# Altium footprint library 1.10-电容.PcbLib: 193 footprints (part 5 of 13)
Each footprint in its own frame and in the unit in brackets; x right, y up, seen from the top. Pads: shape width x height; smd on the part's side, far side on the other; paste and mask are expansions set on the pad; w line width, h text height; cw(c..) or ccw(c..) is an arc to the next point about the centre after c.
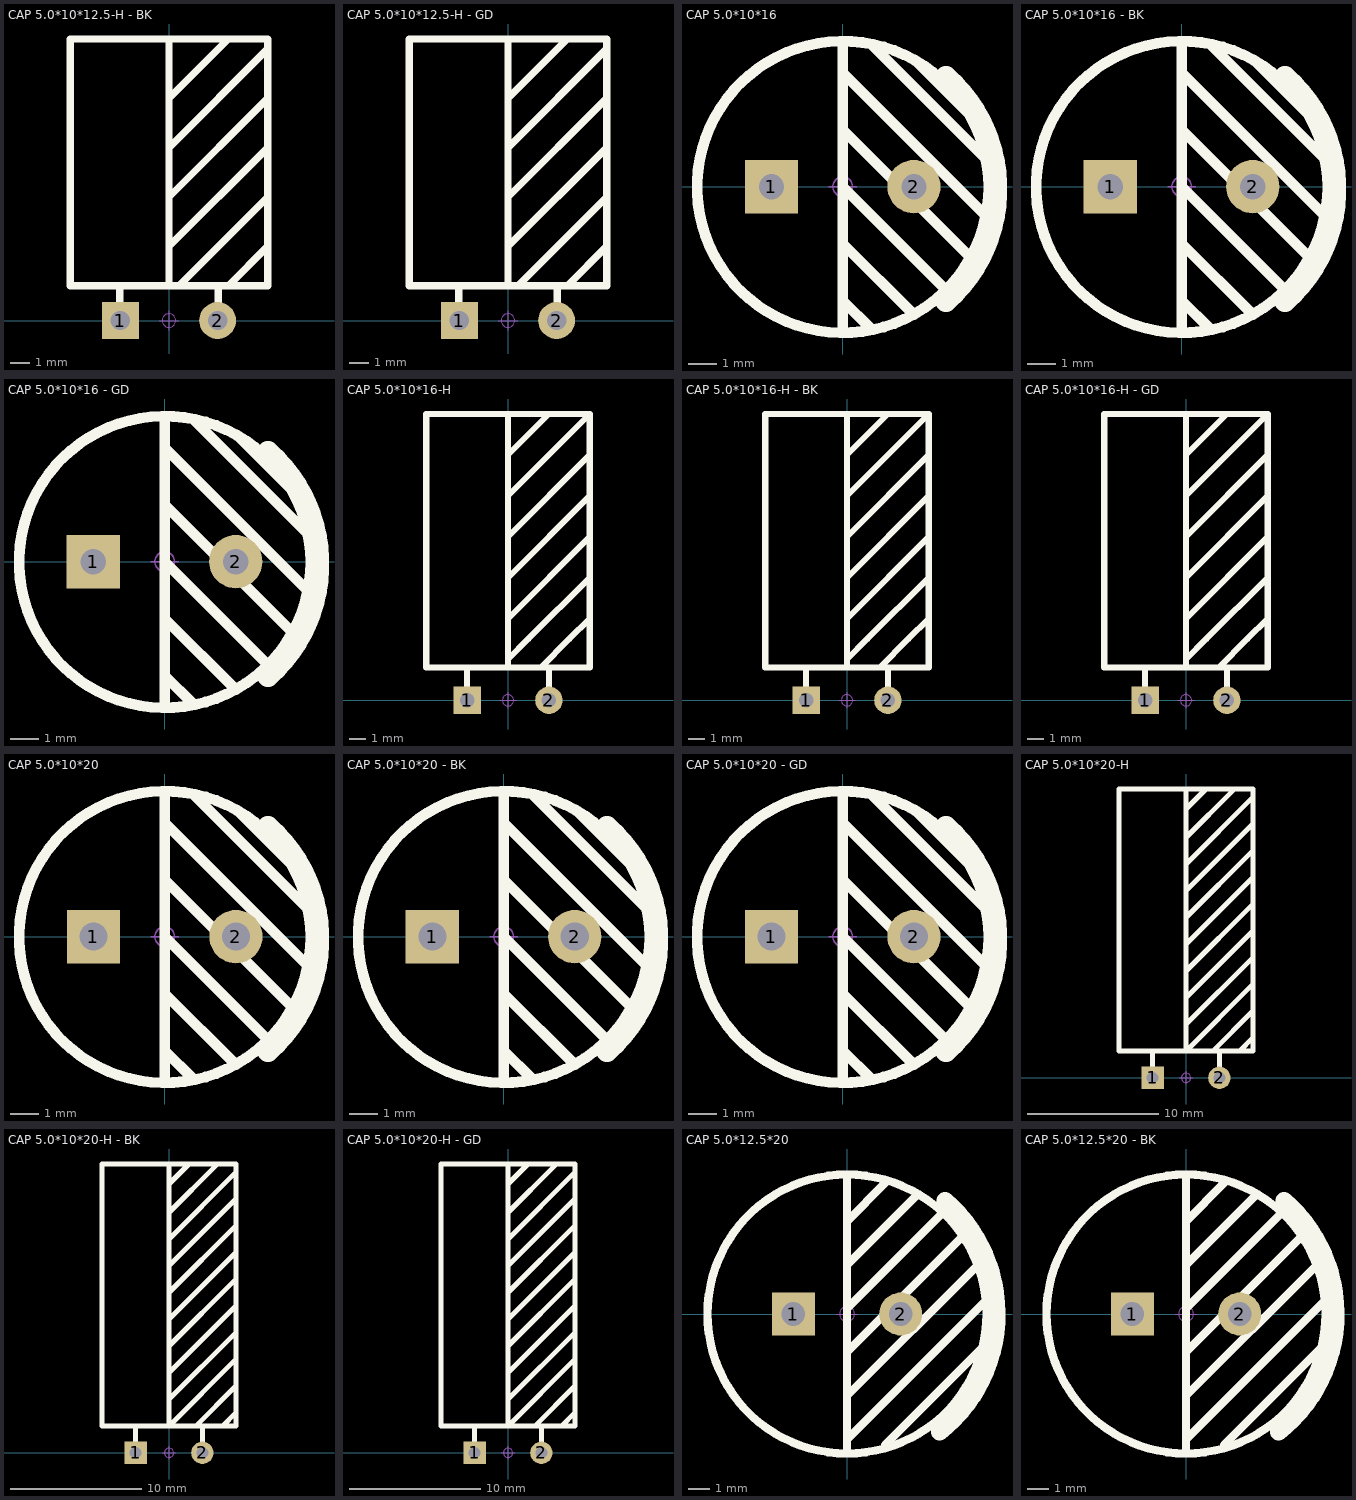
[diagram p4: the footprints below, top view; thin cyan lines are the x and y axes]

## CAP 5.0*10*12.5-H - BK [mm] "脚距5mm直径10mm高度12.5mm             淘宝ID:黄晶宝石"
pads (2):
  rect 1.9x1.9 hole 1: 1(-2.5,0)
  round 1.9 hole 1: 2(2.5,0)
Top Overlay:
  lines w0.381: -2.54,0.762 -2.54,1.778 ; 0,1.778 0,14.41 ; 0,3.81 5.08,8.89 ; 0,6.35 5.08,11.43 ; 0,8.89 5.08,13.97 ; 0,11.43 3.048,14.478 ; 0.508,1.778 5.08,6.35 ; 2.54,0.762 2.54,1.778 ; 3.048,1.778 5.08,3.81 ; -5.08,1.778 -5.08,14.478 5.08,14.478 5.08,1.778 -5.08,1.778
Mechanical 15:
  circle w0.05: c0,0 r0.35
  lines w0.05: -0.5,0 0.5,0 ; 0,-0.5 0,0.5
3D body "CAP 5X10X12.5-H.STEP": height 10.03, standoff -3.48, extent -5,-0.3 5.01,14.41

## CAP 5.0*10*12.5-H - GD [mm] "脚距5mm直径10mm高度12.5mm"
pads (2):
  rect 1.9x1.9 hole 1: 1(-2.5,0)
  round 1.9 hole 1: 2(2.5,0)
Top Overlay:
  lines w0.381: -2.54,0.762 -2.54,1.778 ; 0,1.778 0,14.41 ; 0,3.81 5.08,8.89 ; 0,6.35 5.08,11.43 ; 0,8.89 5.08,13.97 ; 0,11.43 3.048,14.478 ; 0.508,1.778 5.08,6.35 ; 2.54,0.762 2.54,1.778 ; 3.048,1.778 5.08,3.81 ; -5.08,1.778 5.08,1.778 5.08,14.478 -5.08,14.478 -5.08,1.778
Mechanical 15:
  circle w0.05: c0,0 r0.35
  lines w0.05: -0.5,0 0.5,0 ; 0,-0.5 0,0.5
3D body "CAP 5X10X12.5-H.STEP": height 10.03, standoff -3.48, extent -5,-0.3 5.01,14.41

## CAP 5.0*10*16 [mm] "脚距5mm直径10mm高度16mm"
pads (2):
  rect 1.9x1.9 hole 0.9: 1(-2.54,0)
  round 1.9 hole 0.9: 2(2.54,0)
Top Overlay:
  circle w0.381: c0.006,-0.013 r5.2
  lines w0.381: 0,0 3.556,-3.556 ; 0.006,-5.197 0.006,5.072 ; 0.006,-5.082 0.006,-5.075 ; 0.006,-4.064 0.006,-4.07 1.016,-5.08 ; 0.006,-3.054 0.006,-3.05 0.006,-3.043 ; 0.006,-2.032 0.006,-2.038 ; 0.006,1.01 0.006,1.016 ; 0.006,2.032 0.006,2.026 4.572,-2.54 ; 0.006,4.064 0.006,4.058 5.08,-1.016 ; 0.006,5.074 0.006,5.187 ; 1.016,5.08 5.08,1.016 ; 2.54,-4.572 0.006,-2.038 ; 2.667,4.445 4.572,2.54 ; 0.006,-2.038 0.006,-2.038
  lines w0.737: 3.683,-4.105 ccw(c0.153,-0.084) 3.683,3.937
Mechanical 15:
  circle w0.05: c0,0 r0.35
  lines w0.05: -0.5,0 0.5,0 ; 0,-0.5 0,0.5
3D body "CAP 5X10X16.STEP": height 16.04, standoff -3.37, extent -5,-5 5.01,5

## CAP 5.0*10*16 - BK [mm] "脚距5mm直径10mm高度16mm"
pads (2):
  rect 1.9x1.9 hole 0.9: 1(-2.54,0)
  round 1.9 hole 0.9: 2(2.54,0)
Top Overlay:
  circle w0.381: c0.012,-0.013 r5.2
  lines w0.381: 0.006,0 3.562,-3.556 ; 0.012,-5.197 0.012,5.072 ; 0.012,-5.082 0.012,-5.075 ; 0.012,-4.064 0.012,-4.07 1.022,-5.08 ; 0.012,-3.054 0.012,-3.05 0.012,-3.043 ; 0.012,-2.032 0.012,-2.038 ; 0.012,1.01 0.012,1.016 ; 0.012,2.032 0.012,2.026 4.578,-2.54 ; 0.012,4.064 0.012,4.058 5.086,-1.016 ; 0.012,5.074 0.012,5.187 ; 1.022,5.08 5.086,1.016 ; 2.546,-4.572 0.012,-2.038 ; 2.673,4.445 4.578,2.54 ; 0.012,-2.038 0.012,-2.038
  lines w0.737: 3.689,-4.105 ccw(c0.159,-0.084) 3.689,3.937
Mechanical 15:
  circle w0.05: c0.006,0 r0.35
  lines w0.05: -0.494,0 0.506,0 ; 0.006,-0.5 0.006,0.5
3D body "CAP 5X10X16.STEP": height 16.04, standoff -3.37, extent -5,-5 5.01,5

## CAP 5.0*10*16 - GD [mm] "脚距5mm直径10mm高度16mm"
pads (2):
  rect 1.9x1.9 hole 0.9: 1(-2.54,0)
  round 1.9 hole 0.9: 2(2.54,0)
Top Overlay:
  circle w0.381: c0.012,-0.013 r5.2
  lines w0.381: 0.006,0 3.562,-3.556 ; 0.012,-5.197 0.012,5.072 ; 0.012,-5.082 0.012,-5.075 ; 0.012,-4.064 0.012,-4.07 1.022,-5.08 ; 0.012,-3.054 0.012,-3.05 0.012,-3.043 ; 0.012,-2.032 0.012,-2.038 ; 0.012,1.01 0.012,1.016 ; 0.012,2.032 0.012,2.026 4.578,-2.54 ; 0.012,4.064 0.012,4.058 5.086,-1.016 ; 0.012,5.074 0.012,5.187 ; 1.022,5.08 5.086,1.016 ; 2.546,-4.572 0.012,-2.038 ; 2.673,4.445 4.578,2.54 ; 0.012,-2.038 0.012,-2.038
  lines w0.737: 3.689,-4.105 ccw(c0.159,-0.084) 3.689,3.937
Mechanical 15:
  circle w0.05: c0.006,0 r0.35
  lines w0.05: -0.494,0 0.506,0 ; 0.006,-0.5 0.006,0.5
3D body "CAP 5X10X16.STEP": height 16.04, standoff -3.37, extent -5,-5 5.01,5

## CAP 5.0*10*16-H [mm] "脚距5mm直径10mm高度16mm"
pads (2):
  rect 1.7x1.7 hole 0.9: 1(-2.54,0)
  round 1.7 hole 0.9: 2(2.54,0)
Top Overlay:
  lines w0.381: -2.54,0.762 -2.54,1.778 -2.54,2.032 ; 0,2.032 0,2.54 ; 0,3.81 0,17.78 ; 0,4.064 0,2.54 ; 0,5.08 5.08,10.16 ; 0,7.62 5.08,12.7 ; 0,10.16 5.08,15.24 ; 0,12.7 5.08,17.78 ; 0,15.24 2.54,17.78 ; 2.032,2.032 3.81,3.81 5.08,5.08 ; 2.54,0.762 2.54,1.778 2.54,2.032 ; 5.08,7.62 1.27,3.81 0,2.54 ; 5.08,17.78 -5.08,17.78 -5.08,2.032 5.08,2.032 5.08,17.78
Mechanical 15:
  circle w0.05: c0,0 r0.35
  lines w0.05: -0.5,0 0.5,0 ; 0,-0.5 0,0.5
3D body "CAP 5X10X16-H.STEP": height 10.03, standoff -3.47, extent -5.04,-0.3 4.97,17.91

## CAP 5.0*10*16-H - BK [mm] "脚距5mm直径10mm高度16mm"
pads (2):
  rect 1.7x1.7 hole 0.9: 1(-2.54,0)
  round 1.7 hole 0.9: 2(2.54,0)
Top Overlay:
  lines w0.381: -2.54,0.762 -2.54,1.778 -2.54,2.032 ; 0,2.032 0,2.54 ; 0,3.81 0,17.78 ; 0,4.064 0,2.54 ; 0,5.08 5.08,10.16 ; 0,7.62 5.08,12.7 ; 0,10.16 5.08,15.24 ; 0,12.7 5.08,17.78 ; 0,15.24 2.54,17.78 ; 2.032,2.032 3.81,3.81 5.08,5.08 ; 2.54,0.762 2.54,1.778 2.54,2.032 ; 5.08,7.62 1.27,3.81 0,2.54 ; 5.08,17.78 -5.08,17.78 -5.08,2.032 5.08,2.032 5.08,17.78
Mechanical 15:
  circle w0.05: c0,0 r0.35
  lines w0.05: -0.5,0 0.5,0 ; 0,-0.5 0,0.5
3D body "CAP 5X10X16-H.STEP": height 10.03, standoff -3.48, extent -5.04,-0.3 4.97,17.91

## CAP 5.0*10*16-H - GD [mm] "脚距5mm直径10mm高度16mm"
pads (2):
  rect 1.7x1.7 hole 0.9: 1(-2.54,0)
  round 1.7 hole 0.9: 2(2.54,0)
Top Overlay:
  lines w0.381: -2.54,0.762 -2.54,1.778 -2.54,2.032 ; 0,2.032 0,2.54 ; 0,3.81 0,17.78 ; 0,4.064 0,2.54 ; 0,5.08 5.08,10.16 ; 0,7.62 5.08,12.7 ; 0,10.16 5.08,15.24 ; 0,12.7 5.08,17.78 ; 0,15.24 2.54,17.78 ; 2.032,2.032 3.81,3.81 5.08,5.08 ; 2.54,0.762 2.54,1.778 2.54,2.032 ; 5.08,7.62 1.27,3.81 0,2.54 ; 5.08,17.78 -5.08,17.78 -5.08,2.032 5.08,2.032 5.08,17.78
Mechanical 15:
  circle w0.05: c0,0 r0.35
  lines w0.05: -0.5,0 0.5,0 ; 0,-0.5 0,0.5
3D body "CAP 5X10X16-H.STEP": height 10.03, standoff -3.48, extent -5.04,-0.3 4.97,17.91

## CAP 5.0*10*20 [mm] "脚距5mm直径10mm高度20mm"
pads (2):
  rect 1.9x1.9 hole 1: 1(-2.54,0)
  round 1.9 hole 1: 2(2.54,0)
Top Overlay:
  circle w0.381: c0.006,-0.013 r5.2
  lines w0.381: 0,0 3.556,-3.556 ; 0.006,-5.197 0.006,5.072 ; 0.006,-5.082 0.006,-5.075 ; 0.006,-4.064 0.006,-4.07 1.016,-5.08 ; 0.006,-3.054 0.006,-3.05 0.006,-3.043 ; 0.006,-2.032 0.006,-2.038 ; 0.006,1.01 0.006,1.016 ; 0.006,2.032 0.006,2.026 4.572,-2.54 ; 0.006,4.064 0.006,4.058 5.08,-1.016 ; 0.006,5.074 0.006,5.187 ; 1.016,5.08 5.08,1.016 ; 2.54,-4.572 0.006,-2.038 ; 2.667,4.445 4.572,2.54 ; 0.006,-2.038 0.006,-2.038
  lines w0.737: 3.683,-4.105 ccw(c0.153,-0.084) 3.683,3.937
Mechanical 15:
  circle w0.05: c0,0 r0.35
  lines w0.05: -0.5,0 0.5,0 ; 0,-0.5 0,0.5
3D body "CAP 5X10X20.STEP": height 20.03, standoff -3.38, extent -5,-4.998 5.01,4.998

## CAP 5.0*10*20 - BK [mm] "脚距5mm直径10mm高度20mm            淘宝ID:黄晶宝石"
pads (2):
  rect 1.9x1.9 hole 1: 1(-2.54,0)
  round 1.9 hole 1: 2(2.54,0)
Top Overlay:
  circle w0.381: c0.012,-0.013 r5.2
  lines w0.381: 0.006,0 3.562,-3.556 ; 0.012,-5.197 0.012,5.072 ; 0.012,-5.082 0.012,-5.075 ; 0.012,-4.064 0.012,-4.07 1.022,-5.08 ; 0.012,-3.054 0.012,-3.05 0.012,-3.043 ; 0.012,-2.032 0.012,-2.038 ; 0.012,1.01 0.012,1.016 ; 0.012,2.032 0.012,2.026 4.578,-2.54 ; 0.012,4.064 0.012,4.058 5.086,-1.016 ; 0.012,5.074 0.012,5.187 ; 1.022,5.08 5.086,1.016 ; 2.546,-4.572 0.012,-2.038 ; 2.673,4.445 4.578,2.54 ; 0.012,-2.038 0.012,-2.038
  lines w0.737: 3.689,-4.105 ccw(c0.159,-0.084) 3.689,3.937
Mechanical 15:
  circle w0.05: c0.006,0 r0.35
  lines w0.05: -0.494,0 0.506,0 ; 0.006,-0.5 0.006,0.5
3D body "CAP 5X10X20.STEP": height 20.04, standoff -3.37, extent -5,-4.998 5.01,4.998

## CAP 5.0*10*20 - GD [mm] "脚距5mm直径10mm高度20mm"
pads (2):
  rect 1.9x1.9 hole 1: 1(-2.54,0)
  round 1.9 hole 1: 2(2.54,0)
Top Overlay:
  circle w0.381: c0.006,-0.013 r5.2
  lines w0.381: 0,0 3.556,-3.556 ; 0.006,-5.197 0.006,5.072 ; 0.006,-5.082 0.006,-5.075 ; 0.006,-4.064 0.006,-4.07 1.016,-5.08 ; 0.006,-3.054 0.006,-3.05 0.006,-3.043 ; 0.006,-2.032 0.006,-2.038 ; 0.006,1.01 0.006,1.016 ; 0.006,2.032 0.006,2.026 4.572,-2.54 ; 0.006,4.064 0.006,4.058 5.08,-1.016 ; 0.006,5.074 0.006,5.187 ; 1.016,5.08 5.08,1.016 ; 2.54,-4.572 0.006,-2.038 ; 2.667,4.445 4.572,2.54 ; 0.006,-2.038 0.006,-2.038
  lines w0.737: 3.683,-4.105 ccw(c0.153,-0.084) 3.683,3.937
Mechanical 15:
  circle w0.05: c0,0 r0.35
  lines w0.05: -0.5,0 0.5,0 ; 0,-0.5 0,0.5
3D body "CAP 5X10X20.STEP": height 20.04, standoff -3.37, extent -5,-4.998 5.01,4.998

## CAP 5.0*10*20-H [mm] "脚距5mm直径10mm高度20mm"
pads (2):
  rect 1.7x1.7 hole 0.9: 1(-2.54,0)
  round 1.7 hole 0.9: 2(2.54,0)
Top Overlay:
  lines w0.381: -2.54,0.762 -2.54,1.778 -2.54,2.032 ; 0,3.81 0,21.971 ; 0,6.096 5.08,11.176 ; 0,8.128 5.08,13.208 ; 0,9.652 0,10.16 5.08,15.24 ; 0,12.192 5.08,17.272 ; 0,14.224 5.08,19.304 ; 0,16.256 5.08,21.336 ; 0,18.288 3.556,21.844 ; 0,20.32 0,20.447 1.524,21.971 ; 2.032,2.032 5.08,5.08 ; 2.54,0.762 2.54,1.778 2.54,2.032 ; 4.064,2.032 5.08,3.048 ; 5.08,7.112 0,2.032 ; 5.08,9.144 0,4.064 0,2.54 0,2.032 ; 0,2.032 0,2.032 ; -5.08,2.032 -5.08,21.971 5.08,21.971 5.08,2.032 -5.08,2.032
Mechanical 15:
  circle w0.05: c0,0 r0.35
  lines w0.05: -0.5,0 0.5,0 ; 0,-0.5 0,0.5
3D body "CAP 5X10X20-H.STEP": height 10.03, standoff -3.47, extent -5.04,-0.3 4.97,21.91

## CAP 5.0*10*20-H - BK [mm] "脚距5mm直径10mm高度20mm"
pads (2):
  rect 1.7x1.7 hole 0.9: 1(-2.54,0)
  round 1.7 hole 0.9: 2(2.54,0)
Top Overlay:
  lines w0.381: -2.54,0.762 -2.54,1.778 -2.54,2.032 ; 0,3.81 0,21.971 ; 0,6.096 5.08,11.176 ; 0,8.128 5.08,13.208 ; 0,9.652 0,10.16 5.08,15.24 ; 0,12.192 5.08,17.272 ; 0,14.224 5.08,19.304 ; 0,16.256 5.08,21.336 ; 0,18.288 3.556,21.844 ; 0,20.32 0,20.447 1.524,21.971 ; 2.032,2.032 5.08,5.08 ; 2.54,0.762 2.54,1.778 2.54,2.032 ; 4.064,2.032 5.08,3.048 ; 5.08,7.112 0,2.032 ; 5.08,9.144 0,4.064 0,2.54 0,2.032 ; 0,2.032 0,2.032 ; -5.08,2.032 5.08,2.032 5.08,21.971 -5.08,21.971 -5.08,2.032
Mechanical 15:
  circle w0.05: c0,0 r0.35
  lines w0.05: -0.5,0 0.5,0 ; 0,-0.5 0,0.5
3D body "CAP 5X10X20-H.STEP": height 10.03, standoff -3.48, extent -5.04,-0.3 4.97,21.91

## CAP 5.0*10*20-H - GD [mm] "脚距5mm直径10mm高度20mm"
pads (2):
  rect 1.7x1.7 hole 0.9: 1(-2.54,0)
  round 1.7 hole 0.9: 2(2.54,0)
Top Overlay:
  lines w0.381: -2.54,0.762 -2.54,1.778 -2.54,2.032 ; 0,3.81 0,21.971 ; 0,6.096 5.08,11.176 ; 0,8.128 5.08,13.208 ; 0,9.652 0,10.16 5.08,15.24 ; 0,12.192 5.08,17.272 ; 0,14.224 5.08,19.304 ; 0,16.256 5.08,21.336 ; 0,18.288 3.556,21.844 ; 0,20.32 0,20.447 1.524,21.971 ; 2.032,2.032 5.08,5.08 ; 2.54,0.762 2.54,1.778 2.54,2.032 ; 4.064,2.032 5.08,3.048 ; 5.08,7.112 0,2.032 ; 5.08,9.144 0,4.064 0,2.54 0,2.032 ; 0,2.032 0,2.032 ; -5.08,2.032 5.08,2.032 5.08,21.971 -5.08,21.971 -5.08,2.032
Mechanical 15:
  circle w0.05: c0,0 r0.35
  lines w0.05: -0.5,0 0.5,0 ; 0,-0.5 0,0.5
3D body "CAP 5X10X20-H.STEP": height 10.03, standoff -3.48, extent -5.04,-0.3 4.97,21.91

## CAP 5.0*12.5*20 [mm] "脚距5mm直径12.5mm高度20mm"
pads (2):
  rect 2x2 hole 1.1: 1(-2.5,0)
  round 2 hole 1.1: 2(2.5,0)
Top Overlay:
  circle w0.381: c0,0 r6.5
  lines w0.381: 0,-5.08 0,-3.81 6.096,2.286 ; 0,-2.54 0,-1.778 5.334,3.556 ; 0,0 0,0.254 4.318,4.572 ; 0,1.016 0,2.286 3.302,5.588 ; 0,3.048 0,4.064 ; 0,4.318 1.778,6.096 ; 0,6.35 0,-6.35 0,-5.842 6.35,0.508 ; 1.778,-6.096 6.35,-1.524
  lines w0.8: 4.307,-5.503 ccw(c0,0) 4.568,5.289
Mechanical 15:
  circle w0.05: c0,0 r0.35
  lines w0.05: -0.5,0 0.5,0 ; 0,-0.5 0,0.5
3D body "CAP 5X12.5X20.STEP": height 20.03, standoff -3.38, extent -6.25,-6.248 6.26,6.248

## CAP 5.0*12.5*20 - BK [mm] "脚距5mm直径12.5mm高度20mm"
pads (2):
  rect 2x2 hole 1.1: 1(-2.5,0)
  round 2 hole 1.1: 2(2.5,0)
Top Overlay:
  circle w0.381: c0,0 r6.5
  lines w0.381: 0,-5.08 0,-3.81 6.096,2.286 ; 0,-2.54 0,-1.778 5.334,3.556 ; 0,0 0,0.254 4.318,4.572 ; 0,1.016 0,2.286 3.302,5.588 ; 0,3.048 0,4.064 ; 0,4.318 1.778,6.096 ; 0,6.35 0,-6.35 0,-5.842 6.35,0.508 ; 1.778,-6.096 6.35,-1.524
  lines w0.8: 4.307,-5.503 ccw(c0,0) 4.568,5.289
Mechanical 15:
  circle w0.05: c0,0 r0.35
  lines w0.05: -0.5,0 0.5,0 ; 0,-0.5 0,0.5
3D body "CAP 5X12.5X20.STEP": height 20.04, standoff -3.37, extent -6.25,-6.248 6.26,6.248